# Altium footprint library Schottky_SOD323.PcbLib: 1 footprints
Each footprint in its own frame and in the unit in brackets; x right, y up, seen from the top. Pads: shape width x height; smd on the part's side, far side on the other; paste and mask are expansions set on the pad; w line width, h text height; cw(c..) or ccw(c..) is an arc to the next point about the centre after c.
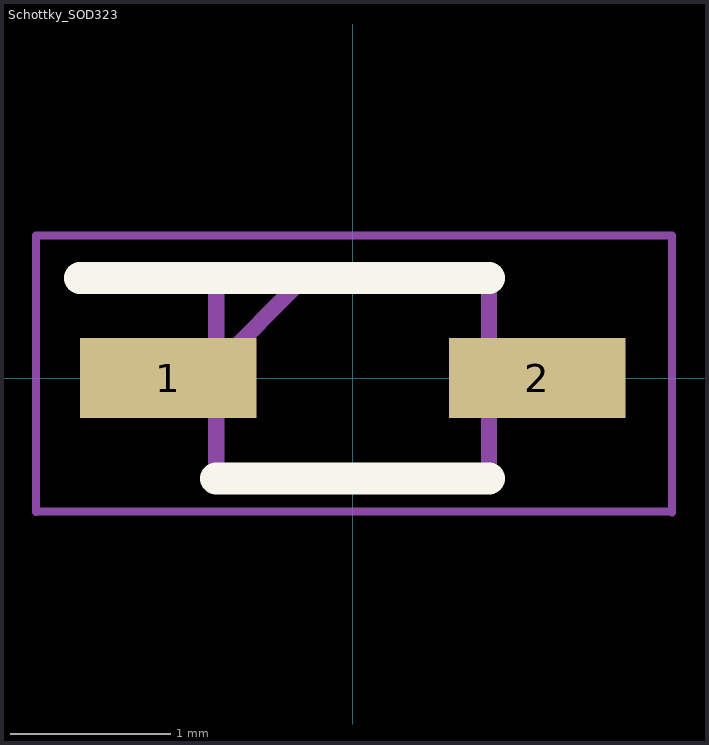
[diagram p0: the footprint, top view; thin cyan lines are the x and y axes]

## Schottky_SOD323 [mm]
pads (2):
  rect 1.1x0.5 smd: 1(-1.15,0) 2(1.15,0)
Top Overlay:
  lines w0.2: -1.7,0.625 0.85,0.625 ; -0.85,-0.625 0.85,-0.625
Top Assembly:
  lines w0.05: -1.971,-0.833 1.979,-0.833
Top Courtyard:
  lines w0.1: -0.85,0.075 -0.3,0.625 ; -0.85,-0.625 0.85,-0.625 0.85,0.625 -0.85,0.625 -0.85,-0.625
Bottom Courtyard:
  lines w0.05: -1.975,-0.836 -1.975,0.889 1.992,0.889 1.992,-0.838
3D body "PMEG2005AEA,115.stp": height 0.93, standoff 0, extent -1.244,-0.635 1.244,0.615